# Altium footprint library PCB_ConnectorHDR.PcbLib: 139 footprints (part 1 of 9)
Each footprint in its own frame and in the unit in brackets; x right, y up, seen from the top. Pads: shape width x height; smd on the part's side, far side on the other; paste and mask are expansions set on the pad; w line width, h text height; cw(c..) or ccw(c..) is an arc to the next point about the centre after c.
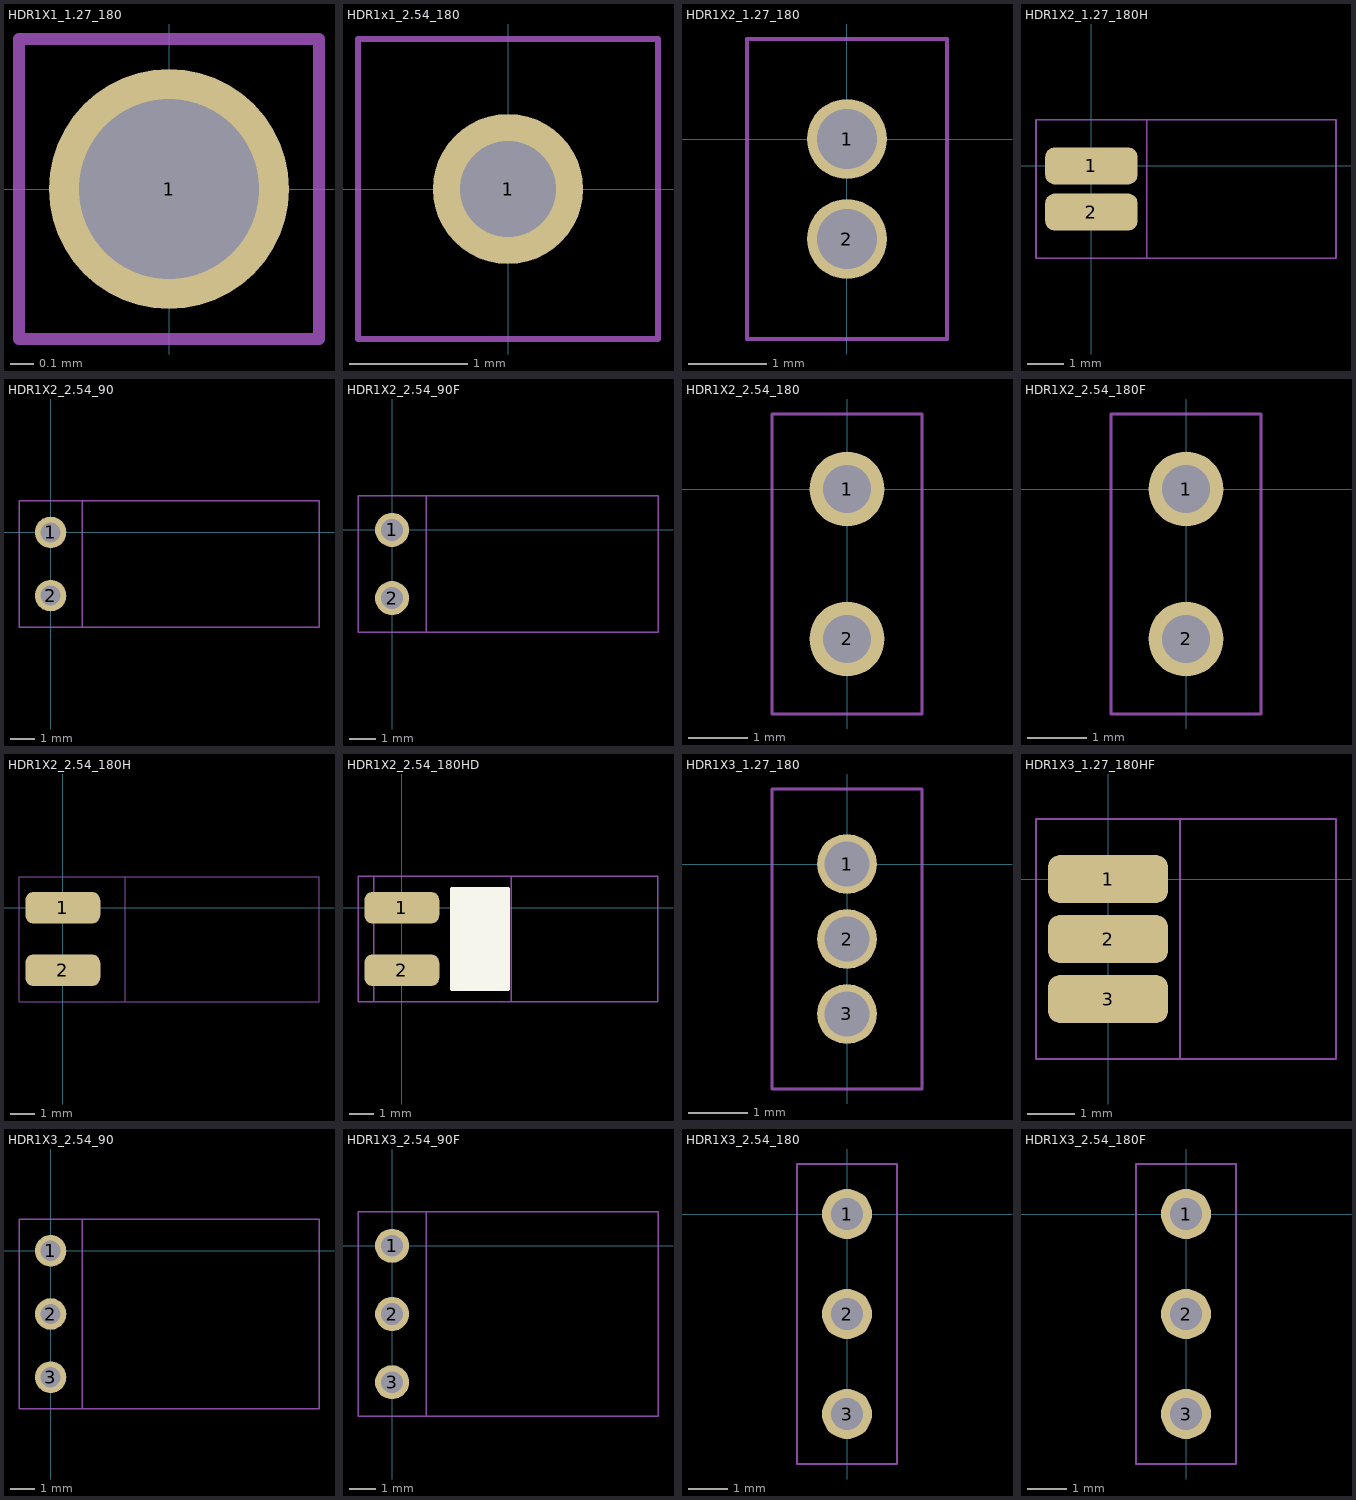
[diagram p0: the footprints below, top view; thin cyan lines are the x and y axes]

## HDR1X1_1.27_180 [mil]
height 169.29
pads (1):
  round 40 hole 30: 1(0,0)
Mechanical 13:
  lines w2: -25,-25 -25,25 25,25 25,-25 -25,-25
T-Component:
  lines w2: -25,-25 25,-25 25,25 -25,25 -25,-25
  text "P1" at -20,-15 h50

## HDR1x1_2.54_180 [mil]
height 169.29
pads (1):
  round 50 hole 32: 1(0,0)
Mechanical 13:
  lines w2: -50,-50 -50,50 50,50 50,-50 -50,-50
T-Component:
  lines w2: -50,-50 -50,50 50,50 50,-50 -50,-50
  text ".Designator" at -31,-20 h80

## HDR1X2_1.27_180 [mil]
height 169.29
pads (2):
  round 40 hole 30: 1(0,0) 2(0,-50)
Mechanical 13:
  lines w2: -50,-100 -50,50 50,50 50,-100 -50,-100
T-Component:
  lines w2: -50,-100 -50,50 50,50 50,-100 -50,-100
  text ".Designator" at -31,-45 h80
3D body "pin_header_a-sl127-eg-g02d.stp": height 210.24, standoff -102.36, extent -49.21,-74.99 49.21,25.01

## HDR1X2_1.27_180H [mil]
height 169.29
pads (2):
  rrect50% 100x40 smd: 1(0,0) 2(0,-50)
Mechanical 13:
  lines w2: -60,-100 265,-100 265,50 -60,50 -60,-100
T-Component:
  lines w2: -60,-100 60,-100 60,50 -60,50 -60,-100
  text ".Designator" at -31,-45 h80
3D body "pin_header_a-sl127-eg-g02d.stp": height 49.21, standoff -49.21, extent -47.36,-74.99 265.24,25.01

## HDR1X2_2.54_90 [mil]
height 169.29
pads (2):
  round 50 hole 32: 1(0,0) 2(0,-100)
Mechanical 13:
  lines w2: -50,-150 -50,50 425,50 425,-150 -50,-150
T-Component:
  lines w2: -50,-150 50,-150 50,50 -50,50 -50,-150
  text ".Designator" at -31,-70 h80
3D body "pin_header_aw140-ea-g02g.stp": height 99.21, standoff -93.7, extent -15,-146.06 423.58,46.06

## HDR1X2_2.54_90F [mil]
height 169.29
pads (2):
  round 50 hole 32: 1(0,0) 2(0,-100)
Mechanical 13:
  lines w2: -50,-150 -50,50 390,50 390,-150 -50,-150
T-Component:
  lines w2: -50,-150 -50,50 50,50 50,-150 -50,-150
  text ".Designator" at -31,-70 h80
3D body "female_header_a-bl254-ea-g02d.stp": height 99.21, standoff -125.2, extent -10,-154.92 386.06,54.92

## HDR1X2_2.54_180 [mil]
height 169.29
pads (2):
  round 50 hole 32: 1(0,0) 2(0,-100)
Mechanical 13:
  lines w2: -50,-150 50,-150 50,50 -50,50 -50,-150
T-Component:
  lines w2: -50,-150 50,-150 50,50 -50,50 -50,-150
  text ".Designator" at -31,-70 h80
3D body "pin_header_aw140-eg-g02d.stp": height 322.83, standoff -118.11, extent -49.18,-150 49.18,50

## HDR1X2_2.54_180F [mil]
height 169.29
pads (2):
  round 50 hole 32: 1(0,0) 2(0,-100)
Mechanical 13:
  lines w2: -50,-150 -50,50 50,50 50,-150 -50,-150
T-Component:
  lines w2: -50,-150 50,-150 50,50 -50,50 -50,-150
  text ".Designator" at -31,-70 h80
3D body "female_header_a-bl254-eg-g02d.stp": height 334.65, standoff -125.98, extent -49.21,-154.92 49.22,54.92

## HDR1X2_2.54_180H [mil]
height 169.29
pads (2):
  rrect50% 120x50 smd: 1(0,0) 2(0,-100)
Mechanical 13:
  lines w2: -70,-150 -70,50 410,50 410,-150 -70,-150
T-Component:
  lines w2: -70,-150 100,-150 100,50 -70,50 -70,-150
  text ".Designator" at -31,-70 h80
3D body "pin_header_aw140-eg-g02d.stp": height 61.32, standoff -37.05, extent -35,-150 405.94,50

## HDR1X2_2.54_180HD [mil]
height 169.29
pads (2):
  rrect50% 120x50 smd: 1(0,0) 2(0,-100)
Top Overlay:
  region: 80,30 170,30 170,-130 80,-130
  lines w6: 80,-130 80,30 170,30 170,-130 80,-130
Mechanical 13:
  lines w2: -45,-150 -45,50 409.65,50 409.65,-150 -45,-150
T-Component:
  lines w2: -70,-150 175,-150 175,50 -70,50 -70,-150
  text ".Designator" at -31,-70 h80
3D body "pin_header_aw140-eg-g02d.stp": height 101.32, standoff 2.95, extent -45.47,-150 395.47,50

## HDR1X3_1.27_180 [mil]
height 169.29
pads (3):
  round 40 hole 30: 1(0,0) 2(0,-50) 3(0,-100)
Mechanical 13:
  lines w2: -50,-150 50,-150 50,50 -50,50 -50,-150
T-Component:
  lines w2: -50,-150 50,-150 50,50 -50,50 -50,-150
  text ".Designator" at -31,-70 h80

## HDR1X3_1.27_180HF [mil]
height 169.29
pads (3):
  rrect50% 100x40 smd: 1(0,0) 2(0,-50) 3(0,-100)
Mechanical 13:
  lines w2: -60,-150 -60,50 190,50 190,-150 -60,-150
T-Component:
  lines w2: -60,-150 60,-150 60,50 -60,50 -60,-150
  text ".Designator" at -31,-70 h80
3D body "female_header_a-bl127-eg-g03d.stp": height 35.43, standoff -35.43, extent -38.35,-132.87 190,32.88

## HDR1X3_2.54_90 [mil]
height 169.29
pads (3):
  round 50 hole 32: 1(0,0) 2(0,-100) 3(0,-200)
Mechanical 13:
  lines w2: -50,-250 -50,50 425,50 425,-250 -50,-250
T-Component:
  lines w2: -50,-250 50,-250 50,50 -50,50 -50,-250
  text ".Designator" at -31,-120 h80
3D body "pin_header_aw140-ea-g03g.stp": height 99.21, standoff -93.7, extent -15,-246.06 423.58,46.06

## HDR1X3_2.54_90F [mil]
height 169.29
pads (3):
  round 50 hole 32: 1(0,0) 2(0,-100) 3(0,-200)
Mechanical 13:
  lines w2: -50,-250 -50,50 390,50 390,-250 -50,-250
T-Component:
  lines w2: -50,-250 50,-250 50,50 -50,50 -50,-250
  text ".Designator" at -31,-120 h80
3D body "female_header_a-bl254-ea-g03d.stp": height 99.21, standoff -125.2, extent -10,-254.92 386.06,54.92

## HDR1X3_2.54_180 [mil]
height 169.29
pads (3):
  round 50 hole 32: 1(0,0) 2(0,-100) 3(0,-200)
Mechanical 13:
  lines w2: -50,-250 50,-250 50,50 -50,50 -50,-250
T-Component:
  lines w2: -50,-250 50,-250 50,50 -50,50 -50,-250
  text ".Designator" at -31,-120 h80
3D body "pin_header_aw140-eg-g03d.stp": height 322.83, standoff -118.11, extent -49.18,-250 49.18,50

## HDR1X3_2.54_180F [mil]
height 169.29
pads (3):
  round 50 hole 32: 1(0,0) 2(0,-100) 3(0,-200)
Mechanical 13:
  lines w2: -50,-250 50,-250 50,50 -50,50 -50,-250
T-Component:
  lines w2: -50,-250 50,-250 50,50 -50,50 -50,-250
  text ".Designator" at -31,-120 h80
3D body "female_header_a-bl254-eg-g03d.stp": height 334.65, standoff -125.98, extent -49.21,-254.91 49.22,54.92